# Altium footprint library Cole_.PcbLib: 167 footprints (part 7 of 11)
Each footprint in its own frame and in the unit in brackets; x right, y up, seen from the top. Pads: shape width x height; smd on the part's side, far side on the other; paste and mask are expansions set on the pad; w line width, h text height; cw(c..) or ccw(c..) is an arc to the next point about the centre after c.
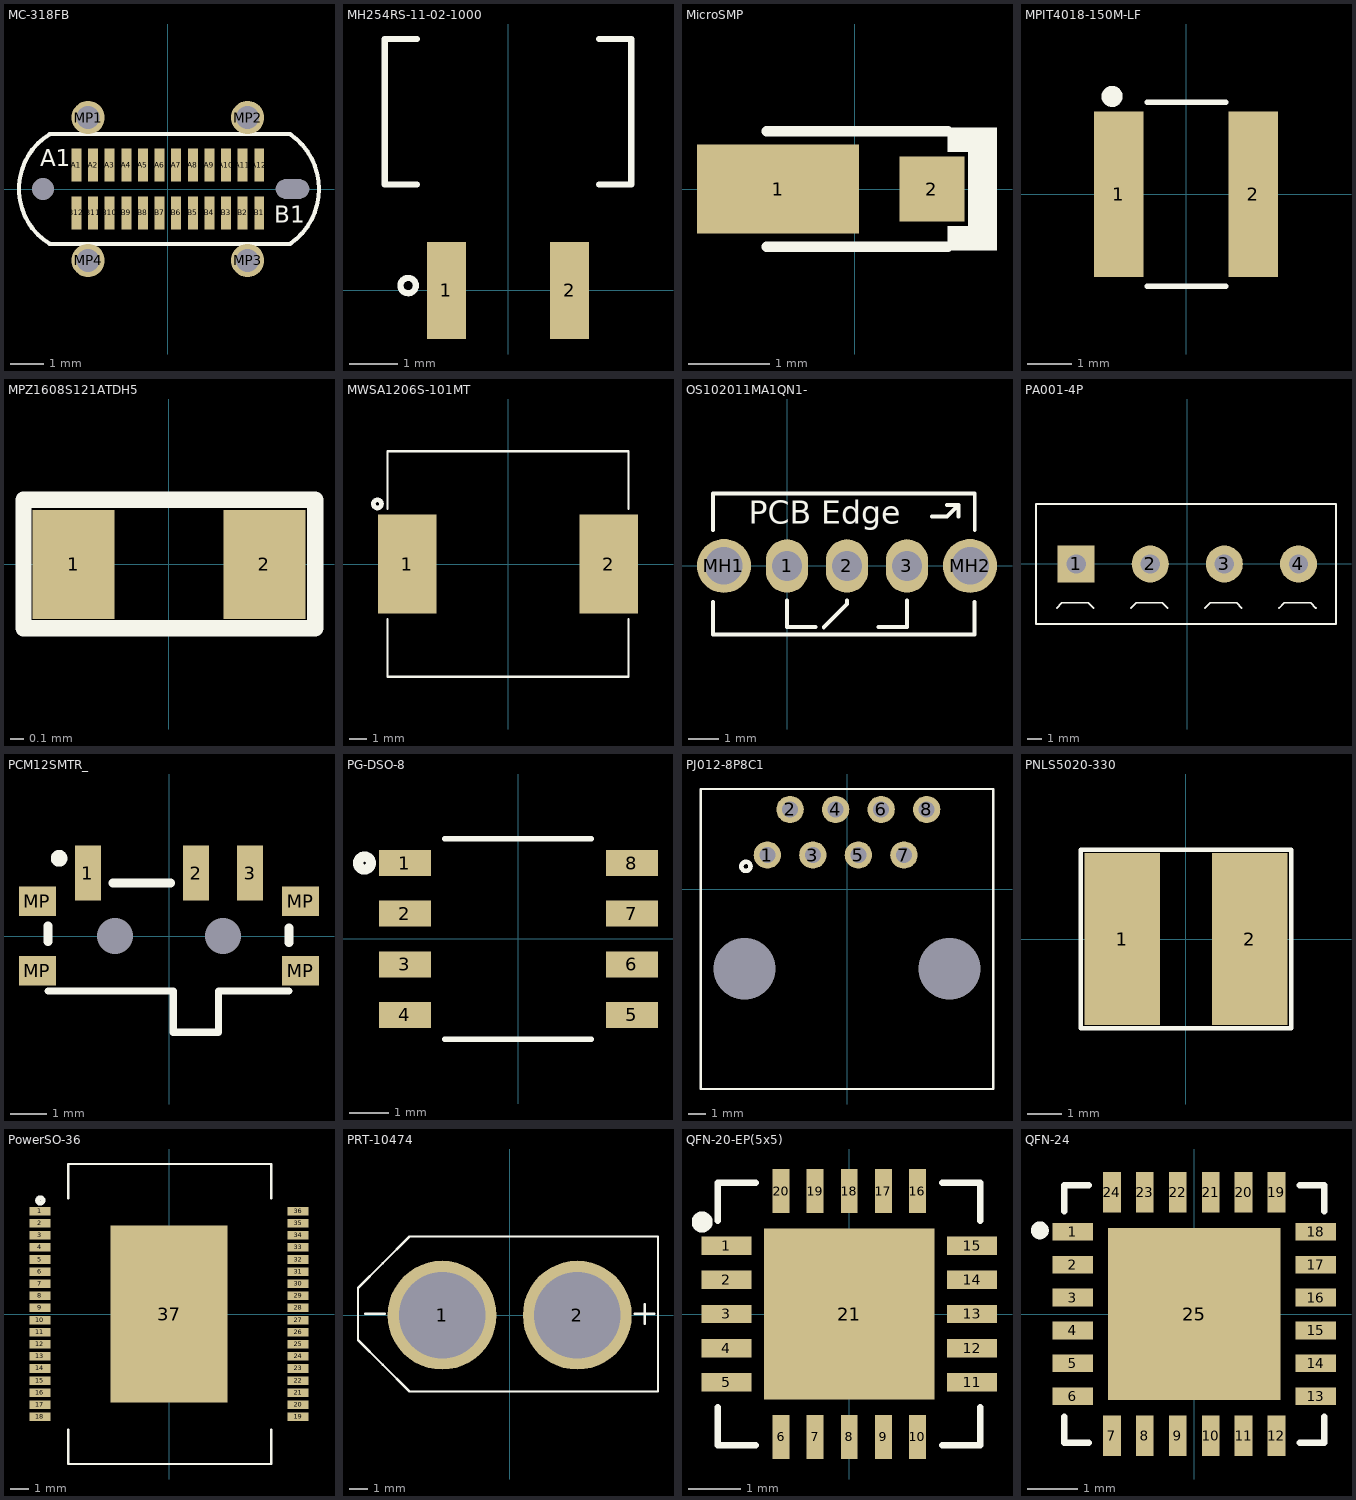
[diagram p6: the footprints below, top view; thin cyan lines are the x and y axes]

## MC-318FB [mm]
pads (30):
  rect 0.3x1 smd: A1(-2.75,0.72) A2(-2.25,0.72) A3(-1.75,0.72) A4(-1.25,0.72) A5(-0.75,0.72) A6(-0.25,0.72) A7(0.25,0.72) A8(0.75,0.72) A9(1.25,0.72) A10(1.75,0.72) A11(2.25,0.72) A12(2.75,0.72) B1(2.75,-0.72) B2(2.25,-0.72) B3(1.75,-0.72) B4(1.25,-0.72) B5(0.75,-0.72) B6(0.25,-0.72) B7(-0.25,-0.72) B8(-0.75,-0.72) B9(-1.25,-0.72) B10(-1.75,-0.72) B11(-2.25,-0.72) B12(-2.75,-0.72)
  round 0 hole 0.66 unplated: MH1(-3.75,0)
  round 0 hole 0.58 slot 1 at 0 deg unplated: MH2(3.75,0)
  round 1 hole 0.7: MP1(-2.4,2.15) MP2(2.4,2.15) MP3(2.4,-2.15) MP4(-2.4,-2.15)
Top Overlay:
  lines w0.125: -3.556,-1.651 cw(c-2.54,0) -3.556,1.651 3.683,1.651 cw(c2.54,0) 3.683,-1.651 -3.556,-1.651
  text "B1" at 3.2,-1.016 h0.5
  text "A1" at -3.835,0.686 h0.5
3D body "USB4070-30-C.stp": height 10.49, standoff -1.31, extent -4.427,-2.275 4.445,2.275

## MH254RS-11-02-1000 [mm]
pads (2):
  rect 0.8x2 smd: 1(-1.27,0) 2(1.27,0)
Top Overlay:
  circle w0.127: c-2.057,0.102 r0.158
  lines w0.127: -1.88,2.182 -2.54,2.182 -2.54,5.182 -1.88,5.182 ; 1.88,2.182 2.54,2.182 2.54,5.182 1.88,5.182
3D body "pin_header_a-sl254-ea-g02mp1.stp": height 2.25, standoff -0.25, extent -2.54,-0.612 2.54,10.888

## MicroSMP [mm]
pads (2):
  rect 2x1.1 smd paste+0 mask+0.051: 1(-0.95,0)
  rect 0.8x0.8 smd paste+0 mask+0.051: 2(0.95,0)
Top Overlay:
  region: 1.753,0.762 1.397,0.762 1.397,-0.762 1.753,-0.762
  rectangle: 1.143,0.457 1.422,0.762
  rectangle: 1.143,-0.762 1.422,-0.457
  lines w0.127: -1.092,-0.711 1.143,-0.711 ; -1.092,0.711 1.143,0.711
3D body "MSP3V3HM3_89A.STEP": height 0.66, standoff 0, extent -1.25,-0.65 1.25,0.65

## MPIT4018-150M-LF [mm]
pads (2):
  rect 1.1x3.7 smd: 1(-1.5,0) 2(1.5,0)
Top Overlay:
  circle w0.254: c-1.651,2.184 r0.108
  lines w0.127: -0.864,-2.057 0.889,-2.057 ; -0.864,2.057 0.889,2.057
3D body "srn4018-6r8m.stp": height 1.8, standoff 0, extent -2.2,-2 2.2,2

## MPZ1608S121ATDH5 [mm] "FERRITE BEAD 120 OHM 0603 1LN"
pads (2):
  rect 0.6x0.8 smd: 1(-0.7,0) 2(0.7,0)
Top Overlay:
  lines w0.12: -1.067,-0.468 1.073,-0.468 1.073,0.475 -1.067,0.475 -1.067,-0.468
3D body "742792602.stp": height 0.78, standoff -0.02, extent -0.8,-0.4 0.8,0.4

## MWSA1206S-101MT [mm]
pads (2):
  rect 3.25x5.5 smd: 1(-5.625,0) 2(5.625,0)
Top Overlay:
  circle w0.254: c-7.29,3.353 r0.227
  lines w0.127: -6.725,-3.073 -6.725,-6.3 6.725,-6.3 6.725,-3.073 ; -6.725,3.073 -6.725,6.3 6.725,6.3 6.725,3.073

## OS102011MA1QN1- [mm] "2 Position SPDT Miniature Slide Switch 100MA 12V Through Hole, Right Angle"
pads (5):
  oval 1.4x1.778 hole 1: 1(0,0) 2(2,0) 3(4,0)
  round 1.8 hole 1.25: MH1(-2.1,0) MH2(6.1,0)
Top Overlay:
  lines w0.127: -2.464,-1.194 -2.464,-2.286 6.248,-2.286 6.248,-1.194 ; -2.464,1.194 -2.464,2.413 6.261,2.413 6.261,1.194 ; 0,-1.143 0,-2.032 0.952,-2.032 ; 1.222,-2.048 2,-1.27 2,-1.143 ; 3.048,-2.032 4,-2.032 4,-1.143 ; 4.826,1.651 5.334,1.651 5.715,2.032 ; 5.334,2.032 5.715,2.032 ; 5.715,1.651 5.715,2.032
  text "PCB Edge" at -1.27,1.397 h0.76
3D body "User Library-CK_Slide.step": height 4.71, standoff -2.78, extent -2.4,-2.286 6.21,6.086

## PA001-4P [mm] "P=5mm Screw terminal RoHS"
pads (4):
  rect 2.5x2.5 hole 1.3: 1(-7.5,0)
  round 2.5 hole 1.3: 2(-2.5,0) 3(2.5,0) 4(7.5,0)
Top Overlay:
  lines w0.127: -8.814,-2.972 -8.458,-2.616 -6.68,-2.616 -6.325,-2.972 ; -3.814,-2.972 -3.458,-2.616 -1.68,-2.616 -1.325,-2.972 ; 1.186,-2.972 1.542,-2.616 3.32,-2.616 3.675,-2.972 ; 6.186,-2.972 6.542,-2.616 8.32,-2.616 8.675,-2.972 ; -10.211,-4.039 -10.211,4.039 10.033,4.039 10.033,-4.039 -10.211,-4.039
3D body "Screw Terminal Block 5mm 4-way.step": height 10, standoff -2, extent -10.15,-4 10,4

## PCM12SMTR_ [mm] "SWITCH SLIDE SPDT 300MA 6V"
pads (9):
  rect 0.72x1.52 smd: 1(-2.25,1.75) 2(0.75,1.75) 3(2.25,1.75)
  round 0 hole 1 unplated: MH(-1.5,0) MH(1.5,0)
  rect 1.02x0.82 smd: MP(-3.65,-0.965) MP(-3.65,0.965) MP(3.65,-0.965) MP(3.65,0.965)
Top Overlay:
  circle w0.254: c-3.048,2.159 r0.105
  lines w0.2: -3.353,-1.524 0.117,-1.524 0.117,-2.667 1.372,-2.667 1.372,-1.524 3.327,-1.524
  lines w0.254: -3.353,-0.152 -3.353,0.279 ; -1.549,1.473 0.041,1.473 ; 3.327,-0.178 3.327,0.229
3D body "PCM12SMTR.stp": height 1.4, standoff -0.5, extent -3.85,-2.8 3.85,2.2

## PG-DSO-8 [mm]
pads (8):
  rect 1.31x0.65 smd: 1(-2.845,1.905) 2(-2.845,0.635) 3(-2.845,-0.635) 4(-2.845,-1.905) 5(2.845,-1.905) 6(2.845,-0.635) 7(2.845,0.635) 8(2.845,1.905)
Top Overlay:
  circle w0.254: c-3.861,1.905 r0.163
  lines w0.127: -1.854,-2.515 1.829,-2.515 ; -1.854,2.515 1.829,2.515
3D body "User Library-SOIC-8-1.STEP": height 1.7, standoff -0.05, extent -3,-2.45 3,2.45

## PJ012-8P8C1 [mil]
pads (10):
  round 60 hole 35.43: 1(-175,75) 2(-125,175) 3(-75,75) 4(-25,175) 5(25,75) 6(75,175) 7(125,75) 8(175,175)
  round 0 hole 135.83 unplated: MH1(225,-175) MH2(-225,-175)
Top Overlay:
  circle w10: c-222,50 r10.05
  lines w5: -321,-439 -321,220 321,220 321,-439 -321,-439
3D body "5520259-4.stp": height 669.29, standoff -110.71, extent -359.49,-436.5 355.51,218.51

## PNLS5020-330 [mm]
pads (2):
  rect 2.2x5 smd mask+0.055: 1(-1.85,0) 2(1.85,0)
Top Overlay:
  lines w0.127: -3.048,-2.591 3.048,-2.591 ; -3.048,-2.565 -3.048,2.591 3.048,2.591 3.048,-2.565
3D body "2108150030_DMBJ-PNLS5020-330_C2849490 (1).STEP": height 2, standoff 0, extent -2.5,-2.5 2.5,2.5

## PowerSO-36 [mm]
pads (37):
  rect 1.15x0.46 smd mask+0.055: 1(-6.925,5.525) 2(-6.925,4.875) 3(-6.925,4.225) 4(-6.925,3.575) 5(-6.925,2.925) 6(-6.925,2.275) 7(-6.925,1.625) 8(-6.925,0.975) 9(-6.925,0.325) 10(-6.925,-0.325) 11(-6.925,-0.975) 12(-6.925,-1.625) 13(-6.925,-2.275) 14(-6.925,-2.925) 15(-6.925,-3.575) 16(-6.925,-4.225) 17(-6.925,-4.875) 18(-6.925,-5.525) 19(6.925,-5.525) 20(6.925,-4.875) 21(6.925,-4.225) 22(6.925,-3.575) 23(6.925,-2.925) 24(6.925,-2.275) 25(6.925,-1.625) 26(6.925,-0.975) 27(6.925,-0.325) 28(6.925,0.325) 29(6.925,0.975) 30(6.925,1.625) 31(6.925,2.275) 32(6.925,2.925) 33(6.925,3.575) 34(6.925,4.225) 35(6.925,4.875) 36(6.925,5.525)
  rect 6.3x9.5 smd mask+0.055: 37(0,0)
Top Overlay:
  circle w0.254: c-6.909,6.096 r0.148
  lines w0.127: -5.41,-6.198 -5.41,-8.052 5.486,-8.052 5.486,-6.198 ; -5.41,6.198 -5.41,8.052 5.486,8.052 5.486,6.198
3D body "PowerSO-36_STM.step": height 3.61, standoff 0, extent -7.252,-8.001 7.252,8.001

## PRT-10474 [mm]
pads (2):
  round 5.8 hole 4.6: 1(-3.6,0) 2(3.6,0)
Top Overlay:
  lines w0.127: -7.698,0.076 -6.657,0.076 ; 6.657,0.076 7.698,0.076 ; 7.188,-0.446 7.188,0.596 ; -8.077,-1.321 -6.756,-2.642 -5.334,-4.064 7.899,-4.064 7.899,4.191 -5.334,4.191 -6.756,2.769 -8.077,1.448 -8.077,-1.321
3D body "User Library-XT60 male.step": height 16.3, standoff -4.9, extent -8.051,-4.013 7.849,4.137

## QFN-20-EP(5x5) [mm]
pads (21):
  rect 0.95x0.35 smd: 1(-2.34,1.3) 2(-2.34,0.65) 3(-2.34,0) 4(-2.34,-0.65) 5(-2.34,-1.3) 11(2.34,-1.3) 12(2.34,-0.65) 13(2.34,0) 14(2.34,0.65) 15(2.34,1.3)
  rect 0.32x0.84 smd: 6(-1.3,-2.34) 7(-0.65,-2.34) 8(0,-2.34) 9(0.65,-2.34) 10(1.3,-2.34) 16(1.3,2.34) 17(0.65,2.34) 18(0,2.34) 19(-0.65,2.34) 20(-1.3,2.34)
  rect 3.25x3.25 smd paste-0.595: 21(0,0)
Top Overlay:
  circle w0.2: c-2.801,1.753 r0.1
  lines w0.127: -2.507,-1.78 -2.507,-2.5 -1.787,-2.5 ; -2.507,1.78 -2.507,2.5 -1.787,2.5 ; 1.773,-2.5 2.493,-2.5 2.493,-1.78 ; 1.773,2.5 2.493,2.5 2.493,1.78
3D body "step_temp.STEP": height 0.8, standoff 0, extent -2.5,-2.5 2.5,2.5

## QFN-24 [mm]
pads (25):
  rect 0.8x0.35 smd: 1(-2.4,1.625) 2(-2.4,0.975) 3(-2.4,0.325) 4(-2.4,-0.325) 5(-2.4,-0.975) 6(-2.4,-1.625) 13(2.4,-1.625) 14(2.4,-0.975) 15(2.4,-0.325) 16(2.4,0.325) 17(2.4,0.975) 18(2.4,1.625)
  rect 0.35x0.8 smd: 7(-1.625,-2.4) 8(-0.975,-2.4) 9(-0.325,-2.4) 10(0.325,-2.4) 11(0.975,-2.4) 12(1.625,-2.4) 19(1.625,2.4) 20(0.975,2.4) 21(0.325,2.4) 22(-0.325,2.4) 23(-0.975,2.4) 24(-1.625,2.4)
  rect 3.4x3.4 smd: 25(0,0)
Top Overlay:
  circle w0.2: c-3.048,1.651 r0.076
  lines w0.127: -2.565,-2.032 -2.565,-2.54 -2.083,-2.54 ; -2.565,2.032 -2.565,2.54 -2.083,2.54 ; 2.083,-2.54 2.565,-2.54 2.565,-2.032 ; 2.083,2.54 2.565,2.54 2.565,2.032
3D body "QFN24_BRA.step": height 0.89, standoff 0, extent -2.502,-2.502 2.502,2.502